# Altium footprint library Tony_.PcbLib: 94 footprints (part 4 of 6)
Each footprint in its own frame and in the unit in brackets; x right, y up, seen from the top. Pads: shape width x height; smd on the part's side, far side on the other; paste and mask are expansions set on the pad; w line width, h text height; cw(c..) or ccw(c..) is an arc to the next point about the centre after c.
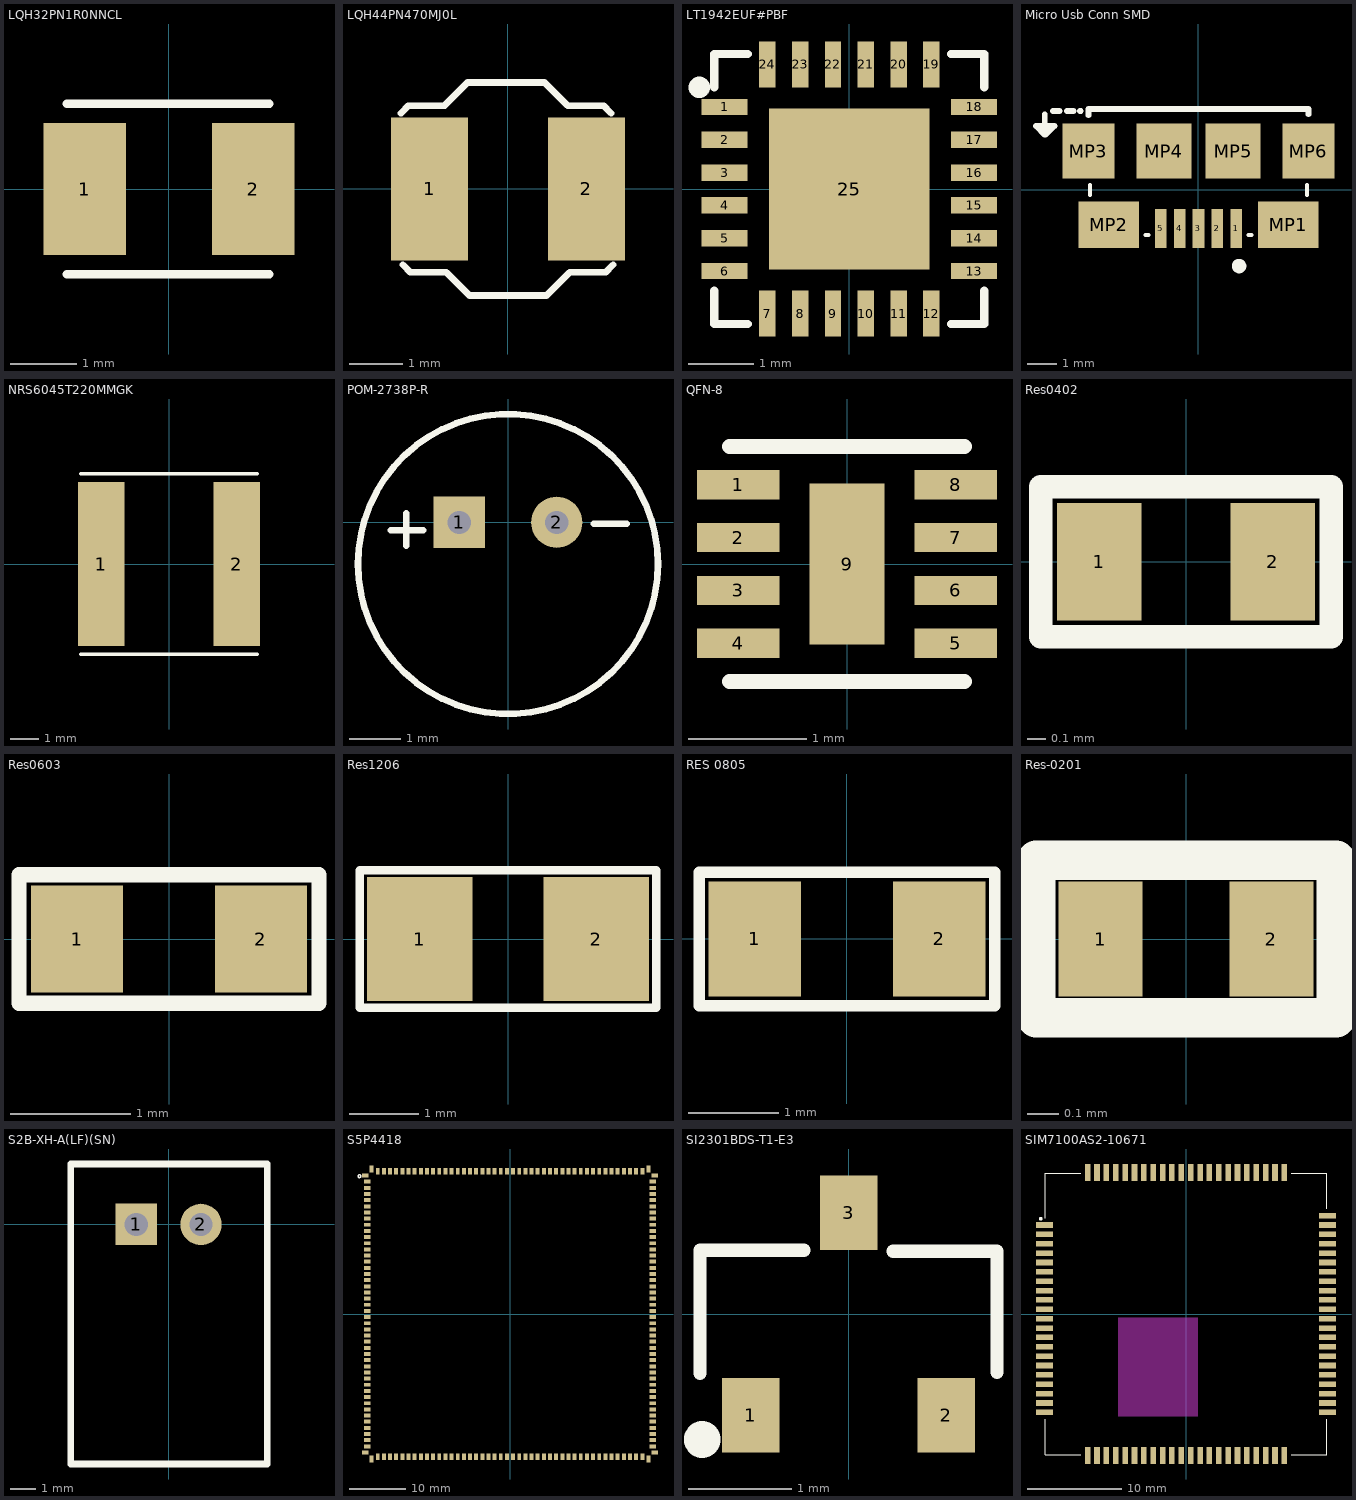
[diagram p3: the footprints below, top view; thin cyan lines are the x and y axes]

## LQH32PN1R0NNCL [mm]
pads (2):
  rect 1.25x2 smd: 1(-1.275,0) 2(1.275,0)
Top Overlay:
  lines w0.127: -1.549,-1.295 1.524,-1.295 ; -1.549,1.295 1.524,1.295
3D body "LQH32PN1R0NNCL.STEP": height 1.7, standoff 0, extent -1.6,-1.25 1.6,1.25

## LQH44PN470MJ0L [mm] "1515 Inductors (SMD) ROHS"
pads (2):
  rect 1.45x2.7 smd: 1(-1.475,0) 2(1.475,0)
Top Overlay:
  lines w0.127: -2.017,1.425 -1.873,1.568 -1.198,1.568 -0.762,2.004 0.688,2.004 1.124,1.568 1.799,1.568 1.943,1.425 ; -1.98,-1.427 -1.836,-1.571 -1.161,-1.571 -0.725,-2.007 0.725,-2.007 1.161,-1.571 1.836,-1.571 1.98,-1.427
3D body "LQH44PN470MJ0L.STEP": height 1.2, standoff 0, extent -2,-2 2,2

## LT1942EUF#PBF [mm] "IC REG CONV TFT LCD 4OUT 24QFN"
pads (25):
  rect 0.7x0.25 smd: 1(-1.9,1.25) 2(-1.9,0.75) 3(-1.9,0.25) 4(-1.9,-0.25) 5(-1.9,-0.75) 6(-1.9,-1.25) 13(1.9,-1.25) 14(1.9,-0.75) 15(1.9,-0.25) 16(1.9,0.25) 17(1.9,0.75) 18(1.9,1.25)
  rect 0.25x0.7 smd: 7(-1.25,-1.9) 8(-0.75,-1.9) 9(-0.25,-1.9) 10(0.25,-1.9) 11(0.75,-1.9) 12(1.25,-1.9) 19(1.25,1.9) 20(0.75,1.9) 21(0.25,1.9) 22(-0.25,1.9) 23(-0.75,1.9) 24(-1.25,1.9)
  rect 2.45x2.45 smd: 25(0,0)
Top Overlay:
  circle w0.254: c-2.286,1.549 r0.036
  lines w0.127: -2.057,-1.549 -2.057,-2.057 -1.549,-2.057 ; -2.057,1.549 -2.057,2.057 -1.549,2.057 ; 1.549,-2.057 2.057,-2.057 2.057,-1.549 ; 1.549,2.057 2.057,2.057 2.057,1.549
3D body "QFN-24_UF_LIT.step": height 0.8, standoff 0, extent -2.05,-2.05 2.05,2.05

## Micro Usb Conn SMD [mm] "CONN RCPT USB2.0 MICRO B SMD R/A"
pads (11):
  rect 0.4x1.35 smd: 1(1.3,-1.338) 2(0.65,-1.338) 3(0,-1.338) 4(-0.65,-1.338) 5(-1.3,-1.338)
  rect 2.1x1.6 smd: MP1(3.1,-1.212) MP2(-3.1,-1.212)
  rect 1.8x1.9 smd: MP3(-3.8,1.338) MP6(3.8,1.338)
  rect 1.9x1.9 smd: MP4(-1.2,1.338) MP5(1.2,1.338)
Top Overlay:
  circle w0.3: c1.4,-2.638 r0.1
  lines w0.127: -3.75,-0.188 -3.75,0.162 ; -1.83,-1.563 -1.72,-1.563 ; 1.72,-1.563 1.83,-1.563 ; 3.75,-0.188 3.75,0.162
  lines w0.2: -5.309,2.611 -5.309,1.9 -5.613,2.204 -4.978,2.204 -5.283,1.9 ; -5.029,2.718 -4.801,2.718 ; -4.547,2.718 -4.318,2.718 ; -4.089,2.718 -4.064,2.718 ; -3.8,2.575 -3.8,2.788 3.8,2.788 3.8,2.611
3D body "10118192C.stp": height 2.74, standoff -0.27, extent -3.95,-1.575 3.962,4.086

## NRS6045T220MMGK [mm] "FIXED IND 22UH 1.6A 139.1MOHM SM"
pads (2):
  rect 1.6x5.7 smd: 1(-2.35,0) 2(2.35,0)
Top Overlay:
  lines w0.127: -3.048,-3.124 3.048,-3.124 ; -3.048,3.124 3.048,3.124
3D body "IND_TAIYO_NRS6045_TAY.step": height 4.5, standoff 0, extent -3.099,-3.101 3.099,3.101

## POM-2738P-R [mm]
pads (2):
  rect 1x1 hole 0.45: 1(-0.95,0)
  round 1 hole 0.45: 2(0.95,0)
Top Overlay:
  circle w0.127: c0,-0.813 r2.925
  lines w0.127: -2.286,-0.152 -1.651,-0.152 ; -1.981,-0.457 -1.981,0.178 ; 1.676,-0.025 2.311,-0.025
3D body "MIC POM-2738P-R.STEP": height 2.9, standoff -2.7, extent -3,-3.787 3,2.213

## QFN-8 [mm]
pads (9):
  rect 0.7x0.25 smd: 1(-0.925,0.675) 2(-0.925,0.225) 3(-0.925,-0.225) 4(-0.925,-0.675) 5(0.925,-0.675) 6(0.925,-0.225) 7(0.925,0.225) 8(0.925,0.675)
  rect 0.64x1.37 smd: 9(0,0)
Top Overlay:
  lines w0.127: -1,-1 0,-1 1,-1 ; -1,1 0,1 1,1

## Res0402 [mil]
pads (2):
  rect 18x25 smd mask+4: 1(-18.5,0) 2(18.5,0)
Top Overlay:
  lines w0.13: -32,-17 32,-17
  lines w5: -31,-16 -31,16 31,16 31,-16 -31,-16
3D body "User Library-RES_1005-0402.step": height 16.14, standoff 0, extent -22.63,-10.82 22.64,10.83

## Res0603 [mil]
pads (2):
  rect 30x35 smd: 1(-30,0) 2(30,0)
Top Overlay:
  lines w5: -49,-21 -49,21 49,21 49,-21 -49,-21
3D body "User Library-RESC1608X05N.step": height 17.76, standoff 0, extent -30.52,-16.74 30.51,16.73

## Res1206 [mil]
pads (2):
  rect 60x70 smd: 1(-50,0) 2(50,0)
Top Overlay:
  lines w5: -84,-39 84,-39 84,39 -84,39 -84,-39
3D body "User Library-1206 SMD Resistor.step": height 39.45, standoff 0, extent -62.99,-31.49 63,31.51

## RES 0805 [mil] "SMD 0805"
pads (2):
  rect 40x50 smd: 1(-40,0) 2(40,0)
Top Overlay:
  lines w5: -64,-29 -64,29 64,29 64,-29 -64,-29
3D body "User Library-CR2012-0805.STEP": height 23.62, standoff 0, extent -39.34,-24.75 39.4,24.46

## Res-0201 [mm]
pads (2):
  rect 0.27x0.37 smd: 1(-0.275,0) 2(0.275,0)
Top Overlay:
  lines w0.127: -0.483,-0.254 -0.483,0.254 0.483,0.254 0.483,-0.254 -0.483,-0.254
3D body "User Library-0201(0603M) Res.step": height 0.29, standoff -0.02, extent -0.305,-0.152 0.305,0.153

## S2B-XH-A(LF)(SN) [mm]
pads (2):
  rect 1.6x1.6 hole 0.9: 1(-1.25,0)
  round 1.6 hole 0.9: 2(1.25,0)
Top Overlay:
  lines w0.254: -3.785,-9.271 3.81,-9.271 3.81,2.337 -3.785,2.337 -3.785,-9.271
3D body "S2B-XH-A(LF)(SN)--3DModel-STEP-56544.STEP": height 6.15, standoff -3.4, extent -3.7,-9.214 3.7,2.286

## S5P4418 [mm]
pads (184):
  rect 1.2x0.7 smd: 1(-25.856,24.75) 2(-25.5,23.65) 3(-25.5,22.55) 4(-25.5,21.45) 5(-25.5,20.35) 6(-25.5,19.25) 7(-25.5,18.15) 8(-25.5,17.05) 9(-25.5,15.95) 10(-25.5,14.85) 11(-25.5,13.75) 12(-25.5,12.65) 13(-25.5,11.55) 14(-25.5,10.45) 15(-25.5,9.35) 16(-25.5,8.25) 17(-25.5,7.15) 18(-25.5,6.05) 19(-25.5,4.95) 20(-25.5,3.85) 21(-25.5,2.75) 22(-25.5,1.65) 23(-25.5,0.55) 24(-25.5,-0.55) 25(-25.5,-1.65) 26(-25.5,-2.75) 27(-25.5,-3.85) 28(-25.5,-4.95) 29(-25.5,-6.05) 30(-25.5,-7.15) 31(-25.5,-8.25) 32(-25.5,-9.35) 33(-25.5,-10.45) 34(-25.5,-11.55) 35(-25.5,-12.65) 36(-25.5,-13.75) 37(-25.5,-14.85) 38(-25.5,-15.95) 39(-25.5,-17.05) 40(-25.5,-18.15) 41(-25.5,-19.25) 42(-25.5,-20.35) 43(-25.5,-21.45) 44(-25.5,-22.55) 45(-25.5,-23.65) 46(-25.856,-24.75) 93(25.856,-24.75) 94(25.5,-23.65) 95(25.5,-22.55) 96(25.5,-21.45) 97(25.5,-20.35) 98(25.5,-19.25) 99(25.5,-18.15) 100(25.5,-17.05) 101(25.5,-15.95) 102(25.5,-14.85) 103(25.5,-13.75) 104(25.5,-12.65) 105(25.5,-11.55) 106(25.5,-10.45) 107(25.5,-9.35) 108(25.5,-8.25) 109(25.5,-7.15) 110(25.5,-6.05) 111(25.5,-4.95) 112(25.5,-3.85) 113(25.5,-2.75) 114(25.5,-1.65) 115(25.5,-0.55) 116(25.5,0.55) 117(25.5,1.65) 118(25.5,2.75) 119(25.5,3.85) 120(25.5,4.95) 121(25.5,6.05) 122(25.5,7.15) 123(25.5,8.25) 124(25.5,9.35) 125(25.5,10.45) 126(25.5,11.55) 127(25.5,12.65) 128(25.5,13.75) 129(25.5,14.85) 130(25.5,15.95) 131(25.5,17.05) 132(25.5,18.15) 133(25.5,19.25) 134(25.5,20.35) 135(25.5,21.45) 136(25.5,22.55) 137(25.5,23.65) 138(25.856,24.75)
  rect 0.7x1.2 smd: 47(-24.75,-25.932) 48(-23.65,-25.5) 49(-22.55,-25.5) 50(-21.45,-25.5) 51(-20.35,-25.5) 52(-19.25,-25.5) 53(-18.15,-25.5) 54(-17.05,-25.5) 55(-15.95,-25.5) 56(-14.85,-25.5) 57(-13.75,-25.5) 58(-12.65,-25.5) 59(-11.55,-25.5) 60(-10.45,-25.5) 61(-9.35,-25.5) 62(-8.25,-25.5) 63(-7.15,-25.5) 64(-6.05,-25.5) 65(-4.95,-25.5) 66(-3.85,-25.5) 67(-2.75,-25.5) 68(-1.65,-25.5) 69(-0.55,-25.5) 70(0.55,-25.5) 71(1.65,-25.5) 72(2.75,-25.5) 73(3.85,-25.5) 74(4.95,-25.5) 75(6.05,-25.5) 76(7.15,-25.5) 77(8.25,-25.5) 78(9.35,-25.5) 79(10.45,-25.5) 80(11.55,-25.5) 81(12.65,-25.5) 82(13.75,-25.5) 83(14.85,-25.5) 84(15.95,-25.5) 85(17.05,-25.5) 86(18.15,-25.5) 87(19.25,-25.5) 88(20.35,-25.5) 89(21.45,-25.5) 90(22.55,-25.5) 91(23.65,-25.5) 92(24.75,-25.932) 139(24.75,25.932) 140(23.65,25.5) 141(22.55,25.5) 142(21.45,25.5) 143(20.35,25.5) 144(19.25,25.5) 145(18.15,25.5) 146(17.05,25.5) 147(15.95,25.5) 148(14.85,25.5) 149(13.75,25.5) 150(12.65,25.5) 151(11.55,25.5) 152(10.45,25.5) 153(9.35,25.5) 154(8.25,25.5) 155(7.15,25.5) 156(6.05,25.5) 157(4.95,25.5) 158(3.85,25.5) 159(2.75,25.5) 160(1.65,25.5) 161(0.55,25.5) 162(-0.55,25.5) 163(-1.65,25.5) 164(-2.75,25.5) 165(-3.85,25.5) 166(-4.95,25.5) 167(-6.05,25.5) 168(-7.15,25.5) 169(-8.25,25.5) 170(-9.35,25.5) 171(-10.45,25.5) 172(-11.55,25.5) 173(-12.65,25.5) 174(-13.75,25.5) 175(-14.85,25.5) 176(-15.95,25.5) 177(-17.05,25.5) 178(-18.15,25.5) 179(-19.25,25.5) 180(-20.35,25.5) 181(-21.45,25.5) 182(-22.55,25.5) 183(-23.65,25.5) 184(-24.75,25.932)
Top Overlay:
  circle w0.254: c-26.924,24.638 r0.251
3D body "samsung_4418_asm.stp": height 2.54, standoff 0, extent -26.4,-26.4 26.4,26.4

## SI2301BDS-T1-E3 [mm] "SOT-23-3(TO-236) MOSFETs ROHS"
pads (3):
  rect 0.559x0.724 smd: 1(-0.95,-0.984) 2(0.95,-0.984) 3(0,0.985)
Top Overlay:
  circle w0.254: c-1.422,-1.219 r0.051
  lines w0.127: -1.446,-0.578 -1.446,0.619 -0.432,0.619 ; 0.432,0.61 1.441,0.61 1.441,-0.568
3D body "CircuitWorks-SOT-23.step": height 1.05, standoff -0.05, extent -1.5,-1.25 1.5,1.25

## SIM7100AS2-10671 [mm]
pads (87):
  rect 1.8x0.6 smd: 1(-15.1,9.5) 2(-15.1,8.5) 3(-15.1,7.5) 4(-15.1,6.5) 5(-15.1,5.5) 6(-15.1,4.5) 7(-15.1,3.5) 8(-15.1,2.5) 9(-15.1,1.5) 10(-15.1,0.5) 11(-15.1,-0.5) 12(-15.1,-1.5) 13(-15.1,-2.5) 14(-15.1,-3.5) 15(-15.1,-4.5) 16(-15.1,-5.5) 17(-15.1,-6.5) 18(-15.1,-7.5) 19(-15.1,-8.5) 20(-15.1,-9.5) 41(15.1,-9.5) 42(15.1,-8.5) 43(15.1,-7.5) 44(15.1,-6.5) 45(15.1,-5.5) 46(15.1,-4.5) 47(15.1,-3.5) 48(15.1,-2.5) 49(15.1,-1.5) 50(15.1,-0.5) 51(15.1,0.5) 52(15.1,1.5) 53(15.1,2.5) 54(15.1,3.5) 55(15.1,4.5) 56(15.1,5.5) 57(15.1,6.5) 58(15.1,7.5) 59(15.1,8.5) 60(15.1,9.5) 81(-15.1,-10.5) 82(15.1,-10.5) 85(15.1,10.5)
  rect 0.6x1.8 smd: 21(-9.5,-15.1) 22(-8.5,-15.1) 23(-7.5,-15.1) 24(-6.5,-15.1) 25(-5.5,-15.1) 26(-4.5,-15.1) 27(-3.5,-15.1) 28(-2.5,-15.1) 29(-1.5,-15.1) 30(-0.5,-15.1) 31(0.5,-15.1) 32(1.5,-15.1) 33(2.5,-15.1) 34(3.5,-15.1) 35(4.5,-15.1) 36(5.5,-15.1) 37(6.5,-15.1) 38(7.5,-15.1) 39(8.5,-15.1) 40(9.5,-15.1) 61(9.5,15.1) 62(8.5,15.1) 63(7.5,15.1) 64(6.5,15.1) 65(5.5,15.1) 66(4.5,15.1) 67(3.5,15.1) 68(2.5,15.1) 69(1.5,15.1) 70(0.5,15.1) 71(-0.5,15.1) 72(-1.5,15.1) 73(-2.5,15.1) 74(-3.5,15.1) 75(-4.5,15.1) 76(-5.5,15.1) 77(-6.5,15.1) 78(-7.5,15.1) 79(-8.5,15.1) 80(-9.5,15.1) 83(10.5,-15.1) 84(-10.5,-15.1) 86(-10.5,15.1) 87(10.5,15.1)
Top Overlay:
  circle w0.2: c-15.494,10.16 r0.1
  lines w0.127: -15,-11.2 -15,-15 -11.2,-15 ; -15,10.2 -15,15 -11.2,15 ; 11.2,-15 15,-15 15,-11.2 ; 11.2,15 15,15 15,11.2
Keep-Out Layer:
  region: 1.25,-10.9 -7.25,-10.9 -7.25,-0.4 1.25,-0.4
  region: 1.25,-10.9 -7.25,-10.9 -7.25,-0.4 1.25,-0.4
3D body "User Library-SIM7100C.step": height 3.17, standoff 0, extent -15,-15 15,15